# Altium schematic symbol library RF - U.FL-R-SMT-1(10).SchLib: 1 symbol
Pins are listed as number, name and electrical type; pins without a type are passive.

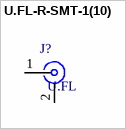
[diagram p0: symbol U.FL-R-SMT-1(10)]

## U.FL-R-SMT-1(10)
designator J?, comment U.FL
U.FL (UMCC) Connector Receptacle, Male Pin 50 Ohms Surface Mount Solder; Manufacturer: Hirose Electric Co Ltd; Manufacturer Part Number: U.FL-R-SMT-1(10); Supplier 1: DigiKey; Supplier Part Number 1: H11891CT-ND; Supplier 2: LCSC; Supplier Part Number 2: C88373; Category: Coaxial Connectors (RF); Case/Package: Surface Mount; Operating Temperature: -40°C ~ 90°C; Lifecycle Status: Active; ComponentLink1Description: Datasheet; ComponentLink1URL: https://mm.digikey.com/Volume0/opasdata/d220001/medias/docus/8942/HIROS08829-1.pdf; ComponentLink2Description: DigiKey; ComponentLink2URL: https://www.digikey.com/en/products/result?keywords=U.FL-R-SMT-1(10)
footprint U.FL - HIROSE (Huella U.FL - HIROSE)
pins: 1 In, 2 Ext